# Altium schematic symbol library ESDSBSLC3V3LT-TP.SchLib: 1 symbol
Pins are listed as number, name and electrical type; pins without a type are passive.

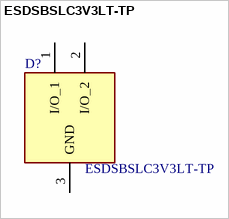
[diagram p0: symbol ESDSBSLC3V3LT-TP]

## ESDSBSLC3V3LT-TP
designator D?
Snap Back ESD Protection Device 65W . -55C to +125C .13A; Manufacturer_Name: MCC; Geometry.Height: 0.55mm; Mouser Part Number: 833-ESDSBSLC3V3LT-TP; Mouser Price/Stock: https://www.mouser.co.uk/ProductDetail/Micro-Commercial-Components-MCC/ESDSBSLC3V3LT-TP?qs=iLKYxzqNS77INex%2FayO2Kw%3D%3D; Manufacturer_Part_Number: ESDSBSLC3V3LT-TP; Datasheet Link: https://www.mccsemi.com/pdf/Products/ESDSBSLC3V3LT(DFN1006-3B).pdf
footprint ESDSBSLC3V3LTTP
pins: 1 I/O_1, 2 I/O_2, 3 GND